# Altium schematic symbol library TPS7A2501DRVR.SchLib: 1 symbol
Pins are listed as number, name and electrical type; pins without a type are passive.

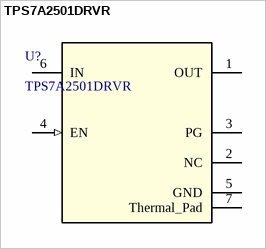
[diagram p0: symbol TPS7A2501DRVR]

## TPS7A2501DRVR
designator U?
300-mA, 18-V, ultra-low-IQ, high-accuracy, adjustable low-dropout voltage regulator with power good 6-WSON -40 to 125; Manufacturer_Name: Texas Instruments; TYPE: TYPE; RefDes: RefDes; Copyright: Copyright (C) 2026 Ultra Librarian. All rights reserved.; Manufacturer_Part_Number: TPS7A2501DRVR
footprint DRV0006A-IPC_A
pins: 1 OUT (power), 2 NC, 3 PG (oc), 4 EN (in), 5 GND (power), 6 IN (power), 7 Thermal_Pad (power)